# Altium footprint library PCB_PTUController.PcbLib: 106 footprints (part 7 of 7)
Each footprint in its own frame and in the unit in brackets; x right, y up, seen from the top. Pads: shape width x height; smd on the part's side, far side on the other; paste and mask are expansions set on the pad; w line width, h text height; cw(c..) or ccw(c..) is an arc to the next point about the centre after c.
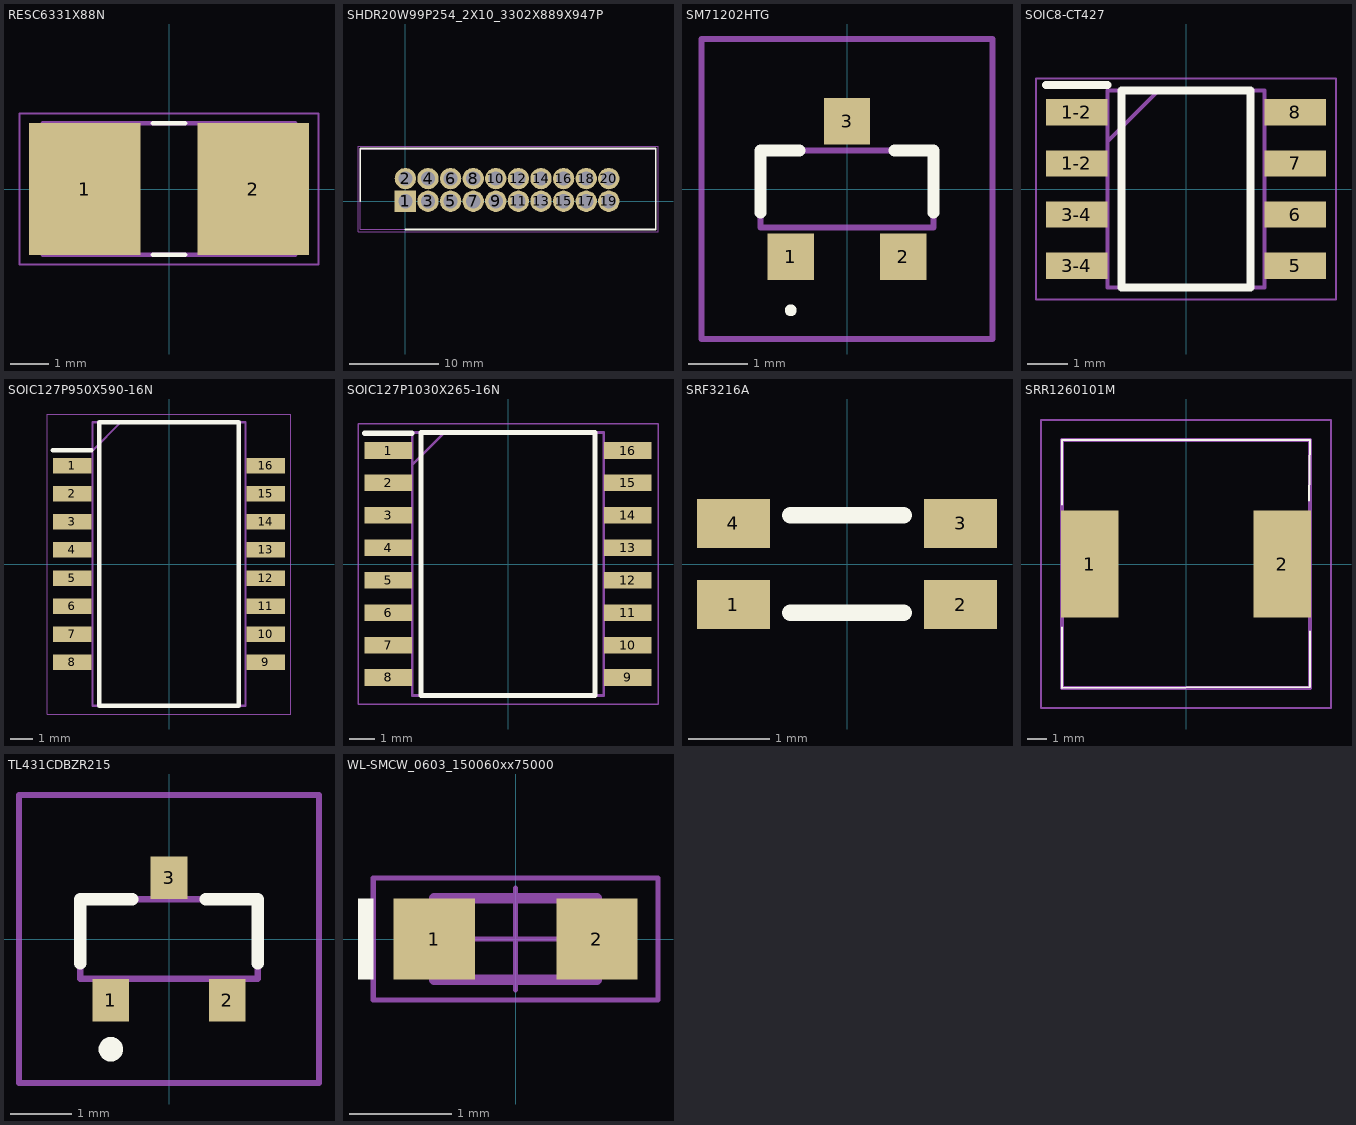
[diagram p6: the footprints below, top view; thin cyan lines are the x and y axes]

## RESC6331X88N [mm]
pads (2):
  rect 2.91x3.44 smd: 1(-2.201,0) 2(2.201,0)
Top Overlay:
  lines w0.127: -0.42,-1.72 0.42,-1.72 ; -0.42,1.72 0.42,1.72
Top 3D Body:
  lines w0.127: -3.3,-1.72 3.3,-1.72 3.3,1.72 -3.3,1.72 -3.3,-1.72
Top Courtyard:
  lines w0.05: -3.906,-1.971 3.906,-1.971 3.906,1.971 -3.906,1.971 -3.906,-1.971

## SHDR20W99P254_2X10_3302X889X947P [mm]
pads (20):
  rect 2.4x2.4 hole 1.6: 1(0,0)
  round 2.4 hole 1.6: 2(0,2.54) 3(2.54,0) 4(2.54,2.54) 5(5.08,0) 6(5.08,2.54) 7(7.62,0) 8(7.62,2.54) 9(10.16,0) 10(10.16,2.54) 11(12.7,0) 12(12.7,2.54) 13(15.24,0) 14(15.24,2.54) 15(17.78,0) 16(17.78,2.54) 17(20.32,0) 18(20.32,2.54) 19(22.86,0) 20(22.86,2.54)
Top Overlay:
  lines w0.2: -5.08,0 -5.08,5.915 28.14,5.915 28.14,-3.175 0,-3.175
Top 3D Body:
  lines w0.1: -5.08,-3.175 -5.08,5.915 28.14,5.915 28.14,-3.175 -5.08,-3.175
Top Courtyard:
  lines w0.05: -5.33,-3.425 -5.33,6.165 28.39,6.165 28.39,-3.425 -5.33,-3.425
3D body "70246-2001.stp": height 9.15, standoff -3.54, extent -4.98,-3.175 28.04,5.715

## SM71202HTG [mm]
pads (3):
  rect 0.78x0.78 smd: 1(-0.95,-1.145) 2(0.95,-1.145) 3(0,1.145)
Top Overlay:
  lines w0.1: -0.95,-2.1 ccw(c-0.95,-2.05) -0.95,-2 ccw(c-0.95,-2.05) -0.95,-2.1
  lines w0.2: -1.46,-0.4 -1.46,0.65 -0.8,0.65 ; 0.8,0.65 1.46,0.65 1.46,-0.4
Top 3D Body:
  lines w0.1: -1.46,-0.65 -1.46,0.65 1.46,0.65 1.46,-0.65 -1.46,-0.65
Top Courtyard:
  lines w0.1: -2.46,-2.535 -2.46,2.535 2.46,2.535 2.46,-2.535 -2.46,-2.535
3D body "SM712-02HTG.stp": height 1.12, standoff 0, extent -1.32,-1.52 1.32,1.52

## SOIC8-CT427 [mm]
pads (8):
  rect 1.525x0.65 smd: 1-2(-2.712,0.635) 1-2(-2.712,1.905) 3-4(-2.712,-1.905) 3-4(-2.712,-0.635) 5(2.712,-1.905) 6(2.712,-0.635) 7(2.712,0.635) 8(2.712,1.905)
Top Overlay:
  lines w0.2: -3.475,2.58 -1.95,2.58 ; -1.6,-2.445 -1.6,2.445 1.6,2.445 1.6,-2.445 -1.6,-2.445
Top 3D Body:
  lines w0.1: -1.95,1.175 -0.68,2.445 ; -1.95,-2.445 -1.95,2.445 1.95,2.445 1.95,-2.445 -1.95,-2.445
Top Courtyard:
  lines w0.05: -3.725,-2.74 -3.725,2.74 3.725,2.74 3.725,-2.74 -3.725,-2.74
3D body "CT417-HSN820MR.stp": height 1.72, standoff 0, extent -3,-2.445 3,2.445

## SOIC127P950X590-16N [mm]
pads (16):
  rect 1.75x0.7 smd: 1(-4.375,4.445) 2(-4.375,3.175) 3(-4.375,1.905) 4(-4.375,0.635) 5(-4.375,-0.635) 6(-4.375,-1.905) 7(-4.375,-3.175) 8(-4.375,-4.445) 9(4.375,-4.445) 10(4.375,-3.175) 11(4.375,-1.905) 12(4.375,-0.635) 13(4.375,0.635) 14(4.375,1.905) 15(4.375,3.175) 16(4.375,4.445)
Top Overlay:
  lines w0.2: -5.25,5.145 -3.5,5.145 ; -3.15,-6.4 -3.15,6.4 3.15,6.4 3.15,-6.4 -3.15,-6.4
Top 3D Body:
  lines w0.1: -3.45,5.13 -2.18,6.4 ; -3.45,-6.4 -3.45,6.4 3.45,6.4 3.45,-6.4 -3.45,-6.4
Top Courtyard:
  lines w0.05: -5.5,-6.775 -5.5,6.775 5.5,6.775 5.5,-6.775 -5.5,-6.775
3D body "SM91072AL-E.stp": height 5.9, standoff 0, extent -4.75,-6.4 4.75,6.4

## SOIC127P1030X265-16N [mm]
pads (16):
  rect 1.87x0.65 smd: 1(-4.69,4.445) 2(-4.69,3.175) 3(-4.69,1.905) 4(-4.69,0.635) 5(-4.69,-0.635) 6(-4.69,-1.905) 7(-4.69,-3.175) 8(-4.69,-4.445) 9(4.69,-4.445) 10(4.69,-3.175) 11(4.69,-1.905) 12(4.69,-0.635) 13(4.69,0.635) 14(4.69,1.905) 15(4.69,3.175) 16(4.69,4.445)
Top Overlay:
  lines w0.2: -5.625,5.12 -3.755,5.12 ; -3.405,-5.15 -3.405,5.15 3.405,5.15 3.405,-5.15 -3.405,-5.15
Top Courtyard:
  lines w0.1: -3.755,3.88 -2.485,5.15 ; -3.755,-5.15 -3.755,5.15 3.755,5.15 3.755,-5.15 -3.755,-5.15
Bottom Assembly:
  lines w0.05: -5.875,-5.5 -5.875,5.5 5.875,5.5 5.875,-5.5 -5.875,-5.5

## SRF3216A [mm] "Common Mode Chip Inductors"
height 2.2
pads (4):
  rect 0.9x0.6 smd: 1(-1.4,-0.5) 2(1.4,-0.5) 3(1.4,0.5) 4(-1.4,0.5)
Top Overlay:
  lines w0.2: -0.7,-0.6 0.7,-0.6 ; -0.7,0.6 0.7,0.6
3D body "SRF3216A.stp": height 1.98, standoff -0.01, extent -1.6,-0.6 1.6,0.6

## SRR1260101M [mm]
pads (2):
  rect 2.9x5.4 smd: 1(-4.85,0) 2(4.85,0)
Top Overlay:
  lines w0.1: -6.25,-3.2 -6.25,-6.25 6.25,-6.2 6.25,-3.4 ; -6.25,3 -6.25,6.25 6.25,6.25 6.2,3.2
Top 3D Body:
  lines w0.2: -6.25,-6.25 -6.25,6.25 6.25,6.25 6.25,-6.25 -6.25,-6.25
Top Courtyard:
  lines w0.1: -7.3,-7.25 -7.3,7.25 7.3,7.25 7.3,-7.25 -7.3,-7.25
3D body "SRR1260-101M.stp": height 6, standoff 0, extent -6.25,-6.25 6.25,6.25

## TL431CDBZR215 [mm]
pads (3):
  rect 0.6x0.7 smd: 1(-0.95,-1) 2(0.95,-1) 3(0,1)
Top Overlay:
  lines w0.2: -1.45,-0.4 -1.45,0.65 -0.6,0.65 ; 0.6,0.65 1.45,0.65 1.45,-0.4 ; -1.05,-1.8 cw(c-0.95,-1.8) -0.85,-1.8 cw(c-0.95,-1.8) -1.05,-1.8
Top 3D Body:
  lines w0.1: -1.45,-0.65 -1.45,0.65 1.45,0.65 1.45,-0.65 -1.45,-0.65
Top Courtyard:
  lines w0.1: -2.45,-2.35 -2.45,2.35 2.45,2.35 2.45,-2.35 -2.45,-2.35
3D body "BSR14.stp": height 0.95, standoff 0, extent -1.452,-1.201 1.448,1.199

## WL-SMCW_0603_150060xx75000 [mm] "SMD Mono-color Chip LED, body 1.60 x 0.80 mm"
height 0.7
pads (2):
  rect 0.8x0.8 smd: 1(-0.8,0) 2(0.8,0)
Top Overlay:
  rectangle: -1.55,-0.4 -1.4,0.4
Top Component Outline:
  rectangle: -0.8,-0.4 -0.5,0.4
  lines w0.1: -0.8,-0.4 -0.8,0.4 0.8,0.4 0.8,-0.4 -0.8,-0.4
Top Courtyard:
  lines w0.05: -1.4,-0.6 -1.4,0.6 1.4,0.6 1.4,-0.6 -1.4,-0.6
Top Component Center:
  lines w0.05: -0.5,0 0.5,0 ; 0,-0.5 0,0.5
Top Designator:
  text ".Designator" at -2.499,-0.167 h0.5
3D body "150060xxx.stp": height 0.7, standoff 0, extent -0.8,-0.4 0.8,0.4